# Altium footprint library Miscellaneous Connectors.PcbLib: 245 footprints (part 15 of 16)
Each footprint in its own frame and in the unit in brackets; x right, y up, seen from the top. Pads: shape width x height; smd on the part's side, far side on the other; paste and mask are expansions set on the pad; w line width, h text height; cw(c..) or ccw(c..) is an arc to the next point about the centre after c.
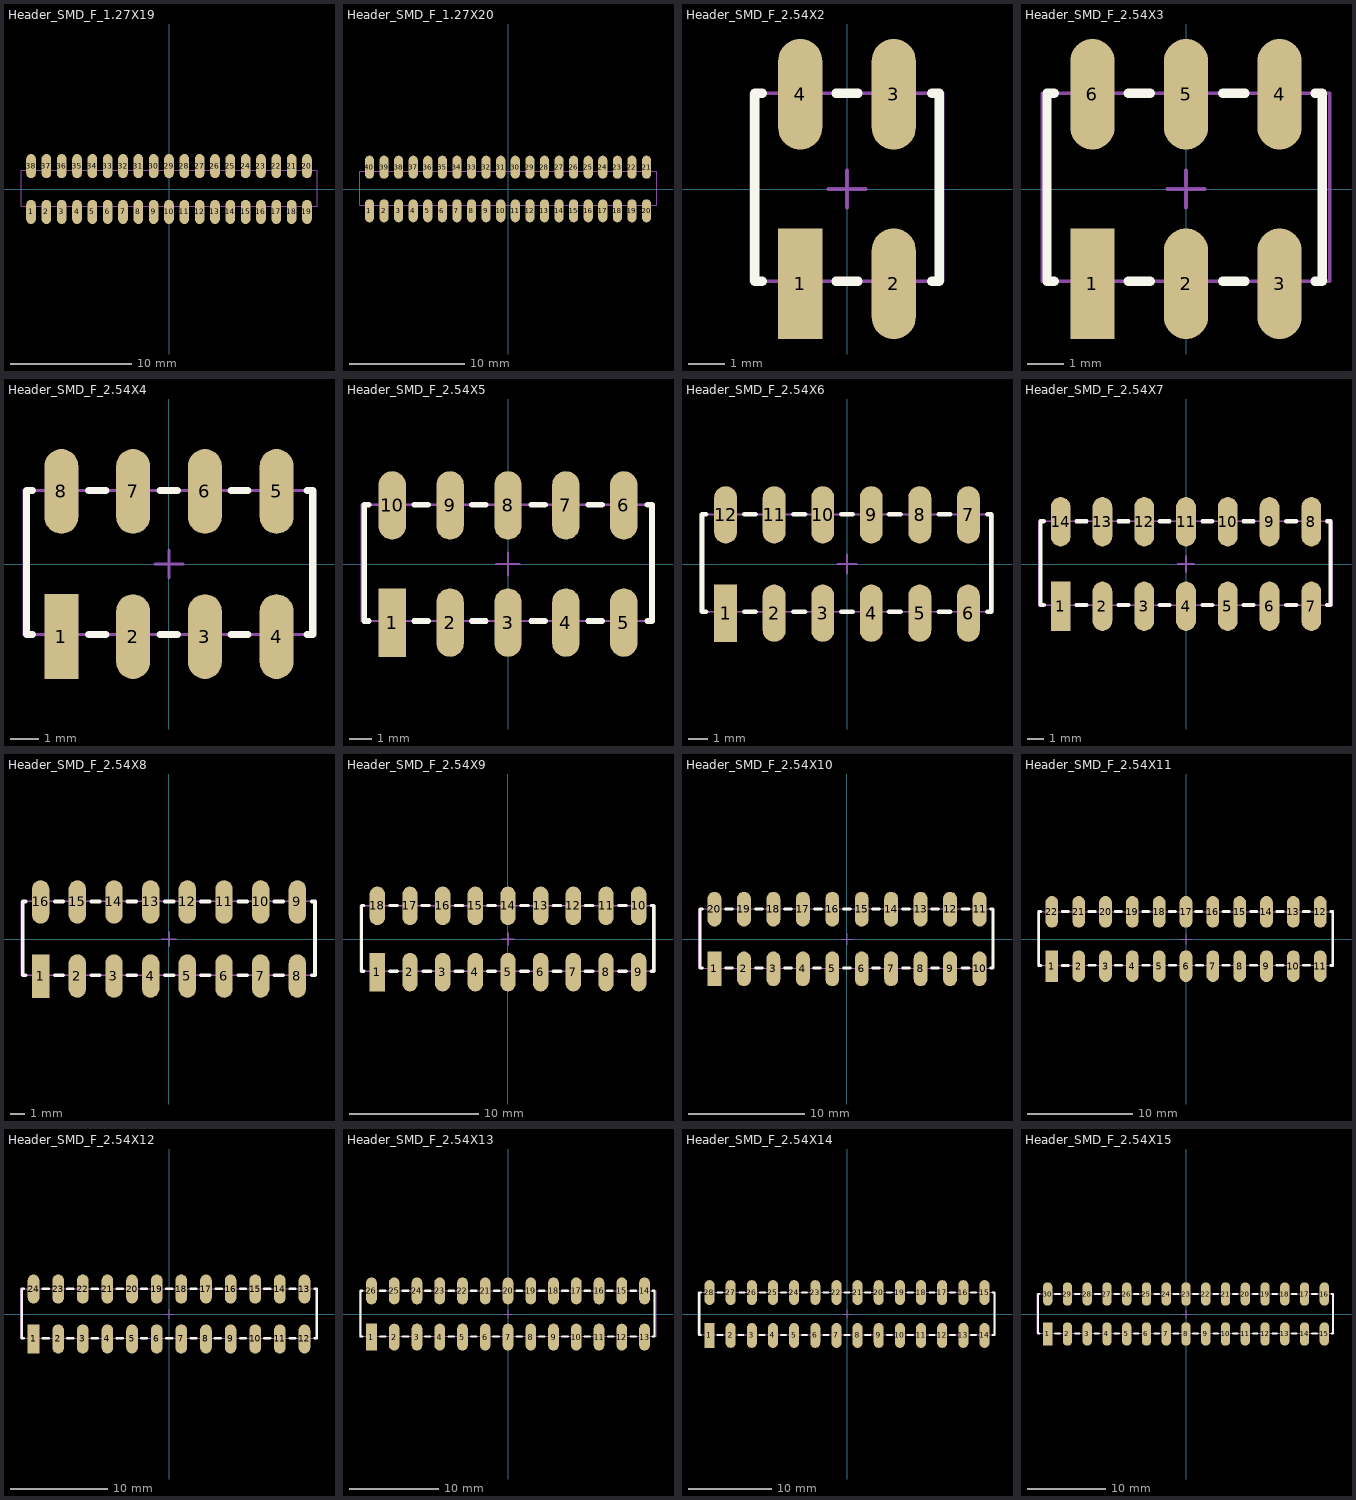
[diagram p14: the footprints below, top view; thin cyan lines are the x and y axes]

## Header_SMD_F_1.27X19 [mm]
pads (38):
  oval 0.8x2 smd: 1(-11.43,-1.9) 2(-10.16,-1.9) 3(-8.89,-1.9) 4(-7.62,-1.9) 5(-6.35,-1.9) 6(-5.08,-1.9) 7(-3.81,-1.9) 8(-2.54,-1.9) 9(-1.27,-1.9) 10(0,-1.9) 11(1.27,-1.9) 12(2.54,-1.9) 13(3.81,-1.9) 14(5.08,-1.9) 15(6.35,-1.9) 16(7.62,-1.9) 17(8.89,-1.9) 18(10.16,-1.9) 19(11.43,-1.9) 20(11.43,1.9) 21(10.16,1.9) 22(8.89,1.9) 23(7.62,1.9) 24(6.35,1.9) 25(5.08,1.9) 26(3.81,1.9) 27(2.54,1.9) 28(1.27,1.9) 29(0,1.9) 30(-1.27,1.9) 31(-2.54,1.9) 32(-3.81,1.9) 33(-5.08,1.9) 34(-6.35,1.9) 35(-7.62,1.9) 36(-8.89,1.9) 37(-10.16,1.9) 38(-11.43,1.9)
Mechanical 15:
  lines w0.1: -12.26,-1.435 12.27,-1.435 12.27,1.565 -12.26,1.565 -12.26,-1.435
3D body: height 4.5, standoff 0, extent -12.26,-2.335 12.27,2.265

## Header_SMD_F_1.27X20 [mm]
pads (40):
  oval 0.8x2 smd: 1(-12.065,-1.9) 2(-10.795,-1.9) 3(-9.525,-1.9) 4(-8.255,-1.9) 5(-6.985,-1.9) 6(-5.715,-1.9) 7(-4.445,-1.9) 8(-3.175,-1.9) 9(-1.905,-1.9) 10(-0.635,-1.9) 11(0.635,-1.9) 12(1.905,-1.9) 13(3.175,-1.9) 14(4.445,-1.9) 15(5.715,-1.9) 16(6.985,-1.9) 17(8.255,-1.9) 18(9.525,-1.9) 19(10.795,-1.9) 20(12.065,-1.9) 21(12.065,1.9) 22(10.795,1.9) 23(9.525,1.9) 24(8.255,1.9) 25(6.985,1.9) 26(5.715,1.9) 27(4.445,1.9) 28(3.175,1.9) 29(1.905,1.9) 30(0.635,1.9) 31(-0.635,1.9) 32(-1.905,1.9) 33(-3.175,1.9) 34(-4.445,1.9) 35(-5.715,1.9) 36(-6.985,1.9) 37(-8.255,1.9) 38(-9.525,1.9) 39(-10.795,1.9) 40(-12.065,1.9)
Mechanical 15:
  lines w0.1: -12.895,-1.435 -12.895,1.565 12.935,1.565 12.935,-1.435 -12.895,-1.435
3D body: height 4.5, standoff 0, extent -12.895,-2.335 12.905,2.265

## Header_SMD_F_2.54X2 [mm]
pads (4):
  rect 1.2x3 smd: 1(-1.27,-2.57)
  oval 1.2x3 smd: 2(1.27,-2.57) 3(1.27,2.57) 4(-1.27,2.57)
Top Overlay:
  lines w0.254: -2.3,-2.5 -2.5,-2.5 -2.5,-2.5 -2.5,2.6 ; -2.3,2.6 -2.5,2.6 ; -0.3,-2.5 0.3,-2.5 ; -0.3,2.6 0.3,2.6 ; 2.3,-2.5 2.5,-2.5 2.5,-2.5 2.5,2.6 ; 2.3,2.6 2.5,2.6 ; -2.5,2.6 -2.5,2.6 ; 2.5,2.6 2.5,2.6
Mechanical 15:
  lines w0.1: -0.5,0 0.5,0 ; 0,-0.5 0,0.5 ; -2.6,-2.5 2.6,-2.5 2.6,2.6 -2.6,2.6 -2.6,-2.5
3D body: height 5.1, standoff 0, extent -2.78,-3.3 2.8,3.3

## Header_SMD_F_2.54X3 [mm]
pads (6):
  rect 1.2x3 smd: 1(-2.54,-2.57)
  oval 1.2x3 smd: 2(0,-2.57) 3(2.54,-2.57) 4(2.54,2.57) 5(0,2.57) 6(-2.54,2.57)
Top Overlay:
  lines w0.254: -3.57,-2.5 -3.77,-2.5 -3.77,-2.5 -3.77,2.6 ; -3.57,2.6 -3.77,2.6 ; -1.57,-2.5 -0.97,-2.5 ; -1.57,2.6 -0.97,2.6 ; 1,-2.5 1.6,-2.5 ; 1,2.6 1.6,2.6 ; 3.5,-2.5 3.7,-2.5 3.7,2.6 3.5,2.6 ; -3.77,2.6 -3.77,2.6
Mechanical 15:
  lines w0.1: -0.5,0 0.5,0 ; 0,-0.5 0,0.5 ; -3.9,-2.5 -3.9,2.6 3.9,2.6 3.9,-2.5 -3.9,-2.5
3D body: height 5.1, standoff 0, extent -4.06,-3.3 4.06,3.3

## Header_SMD_F_2.54X4 [mm]
pads (8):
  rect 1.2x3 smd: 1(-3.81,-2.57)
  oval 1.2x3 smd: 2(-1.27,-2.57) 3(1.27,-2.57) 4(3.81,-2.57) 5(3.81,2.57) 6(1.27,2.57) 7(-1.27,2.57) 8(-3.81,2.57)
Top Overlay:
  lines w0.254: -4.84,-2.5 -5.04,-2.5 -5.04,-2.5 -5.04,2.6 -5.04,2.6 -4.84,2.6 ; -2.84,-2.5 -2.24,-2.5 ; -2.84,2.6 -2.24,2.6 ; -0.31,-2.5 0.29,-2.5 ; -0.31,2.6 0.29,2.6 ; 2.19,-2.5 2.79,-2.5 ; 2.19,2.6 2.79,2.6 ; 4.89,-2.5 5.09,-2.5 5.09,2.6 4.89,2.6
Mechanical 15:
  lines w0.1: -0.5,0 0.5,0 ; 0,-0.5 0,0.5 ; -5.14,-2.5 -5.14,2.6 5.09,2.6 5.09,-2.5 -5.14,-2.5
3D body: height 5.1, standoff 0, extent -5.33,-3.3 5.33,3.3

## Header_SMD_F_2.54X5 [mm]
pads (10):
  rect 1.2x3 smd: 1(-5.08,-2.57)
  oval 1.2x3 smd: 2(-2.54,-2.57) 3(0,-2.57) 4(2.54,-2.57) 5(5.08,-2.57) 6(5.08,2.57) 7(2.54,2.57) 8(0,2.57) 9(-2.54,2.57) 10(-5.08,2.57)
Top Overlay:
  lines w0.254: -6.11,-2.5 -6.31,-2.5 ; -6.11,2.6 -6.31,2.6 ; -4.11,-2.5 -3.51,-2.5 ; -4.11,2.6 -3.51,2.6 ; -1.58,-2.5 -0.98,-2.5 ; -1.58,2.6 -0.98,2.6 ; 1.02,-2.5 1.62,-2.5 ; 1.02,2.6 1.62,2.6 ; 3.52,-2.5 4.12,-2.5 ; 3.52,2.6 4.12,2.6 ; 6.12,-2.5 6.32,-2.5 6.32,2.6 6.12,2.6 ; -6.31,-2.5 -6.31,-2.5 ; -6.31,-2.5 -6.31,2.6 ; -6.31,2.6 -6.31,2.6
Mechanical 15:
  lines w0.1: -0.51,0 0.5,0 ; 0,-0.5 0,0.5 ; -6.41,-2.5 -6.41,2.6 6.32,2.6 6.32,-2.5 -6.41,-2.5
3D body: height 5.1, standoff 0, extent -6.6,-3.3 6.6,3.3

## Header_SMD_F_2.54X6 [mm]
pads (12):
  rect 1.2x3 smd: 1(-6.35,-2.57)
  oval 1.2x3 smd: 2(-3.81,-2.57) 3(-1.27,-2.57) 4(1.27,-2.57) 5(3.81,-2.57) 6(6.35,-2.57) 7(6.35,2.57) 8(3.81,2.57) 9(1.27,2.57) 10(-1.27,2.57) 11(-3.81,2.57) 12(-6.35,2.57)
Top Overlay:
  lines w0.254: -7.38,-2.5 -7.58,-2.5 -7.58,-2.5 -7.58,2.6 ; -7.38,2.6 -7.58,2.6 ; -5.38,-2.5 -4.78,-2.5 ; -5.38,2.6 -4.78,2.6 ; -2.8,-2.5 -2.2,-2.5 ; -2.8,2.6 -2.2,2.6 ; -0.3,-2.5 0.3,-2.5 ; -0.3,2.6 0.3,2.6 ; 2.2,-2.5 2.8,-2.5 ; 2.2,2.6 2.8,2.6 ; 4.8,-2.5 5.4,-2.5 ; 4.8,2.6 5.4,2.6 ; 7.35,-2.5 7.55,-2.5 7.55,2.6 7.35,2.6 ; -7.58,2.6 -7.58,2.6
Mechanical 15:
  lines w0.1: -0.5,0 0.5,0 ; 0,-0.5 0,0.5 ; -7.68,-2.5 7.65,-2.5 7.65,2.6 -7.68,2.6 -7.68,-2.5
3D body: height 5.1, standoff 0, extent -7.87,-3.3 7.87,3.3

## Header_SMD_F_2.54X7 [mm]
pads (14):
  rect 1.2x3 smd: 1(-7.62,-2.57)
  oval 1.2x3 smd: 2(-5.08,-2.57) 3(-2.54,-2.57) 4(0,-2.57) 5(2.54,-2.57) 6(5.08,-2.57) 7(7.62,-2.57) 8(7.62,2.57) 9(5.08,2.57) 10(2.54,2.57) 11(0,2.57) 12(-2.54,2.57) 13(-5.08,2.57) 14(-7.62,2.57)
Top Overlay:
  lines w0.254: -8.65,-2.5 -8.85,-2.5 ; -8.65,2.6 -8.85,2.6 ; -6.65,-2.5 -6.05,-2.5 ; -6.65,2.6 -6.05,2.6 ; -4.1,-2.5 -3.5,-2.5 ; -4.1,2.6 -3.5,2.6 ; -1.6,-2.5 -1,-2.5 ; -1.6,2.6 -1,2.6 ; 1,-2.5 1.6,-2.5 ; 1,2.6 1.6,2.6 ; 3.5,-2.5 4.1,-2.5 ; 3.5,2.6 4.1,2.6 ; 6.1,-2.5 6.7,-2.5 ; 6.1,2.6 6.7,2.6 ; 8.58,-2.5 8.78,-2.5 8.78,2.6 8.58,2.6 ; -8.85,-2.5 -8.85,-2.5 ; -8.85,-2.5 -8.85,2.6 ; -8.85,2.6 -8.85,2.6
Mechanical 15:
  lines w0.1: -0.5,0 0.5,0 ; 0,-0.5 0,0.5 ; -8.95,-2.5 -8.95,2.6 8.88,2.6 8.88,-2.5 -8.95,-2.5
3D body: height 5.1, standoff 0, extent -9.14,-3.3 9.14,3.3

## Header_SMD_F_2.54X8 [mm]
pads (16):
  rect 1.2x3 smd: 1(-8.89,-2.57)
  oval 1.2x3 smd: 2(-6.35,-2.57) 3(-3.81,-2.57) 4(-1.27,-2.57) 5(1.27,-2.57) 6(3.81,-2.57) 7(6.35,-2.57) 8(8.89,-2.57) 9(8.89,2.57) 10(6.35,2.57) 11(3.81,2.57) 12(1.27,2.57) 13(-1.27,2.57) 14(-3.81,2.57) 15(-6.35,2.57) 16(-8.89,2.57)
Top Overlay:
  lines w0.254: -9.92,-2.5 -10.12,-2.5 -10.12,-2.5 -10.12,2.6 -10.12,2.6 -9.92,2.6 ; -7.92,-2.5 -7.32,-2.5 ; -7.92,2.6 -7.32,2.6 ; -5.39,-2.5 -4.79,-2.5 ; -5.39,2.6 -4.79,2.6 ; -2.89,-2.5 -2.29,-2.5 ; -2.89,2.6 -2.29,2.6 ; -0.29,-2.5 0.31,-2.5 ; -0.29,2.6 0.31,2.6 ; 2.21,-2.5 2.81,-2.5 ; 2.21,2.6 2.81,2.6 ; 4.81,-2.5 5.41,-2.5 ; 4.81,2.6 5.41,2.6 ; 7.31,-2.5 7.91,-2.5 ; 7.31,2.6 7.91,2.6 ; 9.91,-2.5 10.11,-2.5 10.11,2.6 9.91,2.6
Mechanical 15:
  lines w0.1: -0.5,0 0.5,0 ; 0,-0.5 0,0.5 ; -10.22,-2.5 -10.22,2.6 10.21,2.6 10.21,-2.5 -10.22,-2.5
3D body: height 5.1, standoff 0, extent -10.41,-3.3 10.41,3.3

## Header_SMD_F_2.54X9 [mm]
pads (18):
  rect 1.2x3 smd: 1(-10.16,-2.57)
  oval 1.2x3 smd: 2(-7.62,-2.57) 3(-5.08,-2.57) 4(-2.54,-2.57) 5(0,-2.57) 6(2.54,-2.57) 7(5.08,-2.57) 8(7.62,-2.57) 9(10.16,-2.57) 10(10.16,2.57) 11(7.62,2.57) 12(5.08,2.57) 13(2.54,2.57) 14(0,2.57) 15(-2.54,2.57) 16(-5.08,2.57) 17(-7.62,2.57) 18(-10.16,2.57)
Top Overlay:
  lines w0.254: -11.19,-2.5 -11.39,-2.5 -11.39,-2.5 -11.39,2.6 -11.39,2.6 -11.19,2.6 ; -9.19,-2.5 -8.59,-2.5 ; -9.19,2.6 -8.59,2.6 ; -6.7,2.6 -6.1,2.6 ; -6.6,-2.5 -6,-2.5 ; -4.1,-2.5 -3.5,-2.5 ; -4.1,2.6 -3.5,2.6 ; -1.6,-2.5 -1,-2.5 ; -1.6,2.6 -1,2.6 ; 1,-2.5 1.6,-2.5 ; 1,2.6 1.6,2.6 ; 3.5,-2.5 4.1,-2.5 ; 3.5,2.6 4.1,2.6 ; 6,-2.5 6.6,-2.5 ; 6,2.6 6.6,2.6 ; 8.6,-2.5 9.2,-2.5 ; 8.6,2.6 9.2,2.6 ; 11.14,-2.5 11.34,-2.5 11.34,2.6 11.14,2.6
Mechanical 15:
  lines w0.1: -0.5,0 0.5,0 ; 0,-0.5 0,0.5 ; -11.49,-2.5 11.44,-2.5 11.44,2.6 -11.49,2.6 -11.49,-2.5
3D body: height 5.1, standoff 0, extent -11.68,-3.3 11.68,3.3

## Header_SMD_F_2.54X10 [mm]
pads (20):
  rect 1.2x3 smd: 1(-11.43,-2.57)
  oval 1.2x3 smd: 2(-8.89,-2.57) 3(-6.35,-2.57) 4(-3.81,-2.57) 5(-1.27,-2.57) 6(1.27,-2.57) 7(3.81,-2.57) 8(6.35,-2.57) 9(8.89,-2.57) 10(11.43,-2.57) 11(11.43,2.57) 12(8.89,2.57) 13(6.35,2.57) 14(3.81,2.57) 15(1.27,2.57) 16(-1.27,2.57) 17(-3.81,2.57) 18(-6.35,2.57) 19(-8.89,2.57) 20(-11.43,2.57)
Top Overlay:
  lines w0.254: -12.46,-2.5 -12.66,-2.5 -12.66,-2.5 -12.66,2.6 -12.66,2.6 -12.46,2.6 ; -10.46,-2.5 -9.86,-2.5 ; -10.46,2.6 -9.86,2.6 ; -7.9,-2.5 -7.3,-2.5 ; -7.9,2.6 -7.3,2.6 ; -5.4,-2.5 -4.8,-2.5 ; -5.4,2.6 -4.8,2.6 ; -2.9,-2.5 -2.3,-2.5 ; -2.8,2.6 -2.2,2.6 ; -0.3,-2.5 0.3,-2.5 ; -0.3,2.6 0.3,2.6 ; 2.2,-2.5 2.8,-2.5 ; 2.2,2.6 2.8,2.6 ; 4.8,-2.5 5.4,-2.5 ; 4.8,2.6 5.4,2.6 ; 7.3,-2.5 7.9,-2.5 ; 7.3,2.6 7.9,2.6 ; 9.9,-2.5 10.5,-2.5 ; 9.9,2.6 10.5,2.6 ; 12.37,-2.5 12.57,-2.5 12.57,2.6 12.37,2.6
Mechanical 15:
  lines w0.1: -0.5,0 0.5,0 ; 0,-0.5 0,0.5 ; -12.76,-2.5 -12.76,2.6 12.67,2.6 12.67,-2.5 -12.76,-2.5
3D body: height 5.1, standoff 0, extent -12.95,-3.3 12.95,3.3

## Header_SMD_F_2.54X11 [mm]
pads (22):
  rect 1.2x3 smd: 1(-12.7,-2.57)
  oval 1.2x3 smd: 2(-10.16,-2.57) 3(-7.62,-2.57) 4(-5.08,-2.57) 5(-2.54,-2.57) 6(0,-2.57) 7(2.54,-2.57) 8(5.08,-2.57) 9(7.62,-2.57) 10(10.16,-2.57) 11(12.7,-2.57) 12(12.7,2.57) 13(10.16,2.57) 14(7.62,2.57) 15(5.08,2.57) 16(2.54,2.57) 17(0,2.57) 18(-2.54,2.57) 19(-5.08,2.57) 20(-7.62,2.57) 21(-10.16,2.57) 22(-12.7,2.57)
Top Overlay:
  lines w0.254: -13.73,-2.5 -13.93,-2.5 ; -13.73,2.6 -13.93,2.6 ; -11.73,-2.5 -11.13,-2.5 ; -11.73,2.6 -11.13,2.6 ; -9.2,-2.5 -8.6,-2.5 ; -9.2,2.6 -8.6,2.6 ; -6.7,-2.5 -6.1,-2.5 ; -6.7,2.6 -6.1,2.6 ; -4.1,-2.5 -3.5,-2.5 ; -4.1,2.6 -3.5,2.6 ; -1.6,-2.5 -1,-2.5 ; -1.6,2.6 -1,2.6 ; 0.9,2.6 1.5,2.6 ; 1,-2.5 1.6,-2.5 ; 3.5,-2.5 4.1,-2.5 ; 3.5,2.6 4.1,2.6 ; 6.1,-2.5 6.7,-2.5 ; 6.1,2.6 6.7,2.6 ; 8.6,-2.5 9.2,-2.5 ; 8.6,2.6 9.2,2.6 ; 11.1,-2.5 11.7,-2.5 ; 11.1,2.6 11.7,2.6 ; 13.7,-2.5 13.9,-2.5 13.9,2.6 13.7,2.6 ; -13.93,-2.5 -13.93,-2.5 ; -13.93,-2.5 -13.93,2.6 ; -13.93,2.6 -13.93,2.6
Mechanical 15:
  lines w0.1: -0.5,0 0.5,0 ; 0,-0.5 0,0.5 ; -14.03,-2.5 -14.03,2.6 14,2.6 14,-2.5 -14.03,-2.5
3D body: height 5.1, standoff 0, extent -14.22,-3.3 14.22,3.3

## Header_SMD_F_2.54X12 [mm]
pads (24):
  rect 1.2x3 smd: 1(-13.97,-2.57)
  oval 1.2x3 smd: 2(-11.43,-2.57) 3(-8.89,-2.57) 4(-6.35,-2.57) 5(-3.81,-2.57) 6(-1.27,-2.57) 7(1.27,-2.57) 8(3.81,-2.57) 9(6.35,-2.57) 10(8.89,-2.57) 11(11.43,-2.57) 12(13.97,-2.57) 13(13.97,2.57) 14(11.43,2.57) 15(8.89,2.57) 16(6.35,2.57) 17(3.81,2.57) 18(1.27,2.57) 19(-1.27,2.57) 20(-3.81,2.57) 21(-6.35,2.57) 22(-8.89,2.57) 23(-11.43,2.57) 24(-13.97,2.57)
Top Overlay:
  lines w0.254: -15,-2.5 -15.2,-2.5 -15.2,-2.5 -15.2,2.6 ; -15,2.6 -15.2,2.6 ; -13,-2.5 -12.4,-2.5 ; -13,2.6 -12.4,2.6 ; -10.47,-2.5 -9.87,-2.5 ; -10.47,2.6 -9.87,2.6 ; -7.97,-2.5 -7.37,-2.5 ; -7.97,2.6 -7.37,2.6 ; -5.37,-2.5 -4.77,-2.5 ; -5.37,2.6 -4.77,2.6 ; -2.87,-2.5 -2.27,-2.5 ; -2.87,2.6 -2.27,2.6 ; -0.27,-2.5 0.33,-2.5 ; -0.27,2.6 0.33,2.6 ; 2.23,-2.5 2.83,-2.5 ; 2.23,2.6 2.83,2.6 ; 4.73,-2.5 5.33,-2.5 ; 4.83,2.6 5.43,2.6 ; 7.33,-2.5 7.93,-2.5 ; 7.33,2.6 7.93,2.6 ; 9.83,-2.5 10.43,-2.5 ; 9.83,2.6 10.43,2.6 ; 12.43,-2.5 13.03,-2.5 ; 12.43,2.6 13.03,2.6 ; 15.03,-2.5 15.23,-2.5 15.23,2.6 15.03,2.6 ; -15.2,2.6 -15.2,2.6
Mechanical 15:
  lines w0.1: -0.5,0 0.5,0 ; 0,-0.5 0,0.5 ; -15.3,-2.5 15.23,-2.5 15.23,2.6 -15.3,2.6 -15.3,-2.5
3D body: height 5.1, standoff 0, extent -15.49,-3.3 15.49,3.3

## Header_SMD_F_2.54X13 [mm]
pads (26):
  rect 1.2x3 smd: 1(-15.24,-2.57)
  oval 1.2x3 smd: 2(-12.7,-2.57) 3(-10.16,-2.57) 4(-7.62,-2.57) 5(-5.08,-2.57) 6(-2.54,-2.57) 7(0,-2.57) 8(2.54,-2.57) 9(5.08,-2.57) 10(7.62,-2.57) 11(10.16,-2.57) 12(12.7,-2.57) 13(15.24,-2.57) 14(15.24,2.57) 15(12.7,2.57) 16(10.16,2.57) 17(7.62,2.57) 18(5.08,2.57) 19(2.54,2.57) 20(0,2.57) 21(-2.54,2.57) 22(-5.08,2.57) 23(-7.62,2.57) 24(-10.16,2.57) 25(-12.7,2.57) 26(-15.24,2.57)
Top Overlay:
  lines w0.254: -16.27,-2.5 -16.47,-2.5 ; -16.27,2.6 -16.47,2.6 ; -14.27,-2.5 -13.67,-2.5 ; -14.27,2.6 -13.67,2.6 ; -11.74,-2.5 -11.14,-2.5 ; -11.74,2.6 -11.14,2.6 ; -9.24,-2.5 -8.64,-2.5 ; -9.24,2.6 -8.64,2.6 ; -6.64,-2.5 -6.04,-2.5 ; -6.64,2.6 -6.04,2.6 ; -4.14,-2.5 -3.54,-2.5 ; -4.14,2.6 -3.54,2.6 ; -1.64,-2.5 -1.04,-2.5 ; -1.54,2.6 -0.94,2.6 ; 0.96,-2.5 1.56,-2.5 ; 0.96,2.6 1.56,2.6 ; 3.46,-2.5 4.06,-2.5 ; 3.46,2.6 4.06,2.6 ; 6.06,-2.5 6.66,-2.5 ; 6.06,2.6 6.66,2.6 ; 8.56,-2.5 9.16,-2.5 ; 8.56,2.6 9.16,2.6 ; 11.06,2.6 11.66,2.6 ; 11.16,-2.5 11.76,-2.5 ; 13.66,-2.5 14.26,-2.5 ; 13.66,2.6 14.26,2.6 ; 16.16,-2.5 16.36,-2.5 16.36,2.6 16.16,2.6 ; -16.47,-2.5 -16.47,-2.5 ; -16.47,-2.5 -16.47,2.6 ; -16.47,2.6 -16.47,2.6
Mechanical 15:
  lines w0.1: -0.5,0 0.5,0 ; 0,-0.5 0,0.5 ; -16.57,-2.5 -16.57,2.6 16.56,2.6 16.56,-2.5 -16.57,-2.5
3D body: height 5.1, standoff 0, extent -16.76,-3.3 16.76,3.3

## Header_SMD_F_2.54X14 [mm]
pads (28):
  rect 1.2x3 smd: 1(-16.51,-2.57)
  oval 1.2x3 smd: 2(-13.97,-2.57) 3(-11.43,-2.57) 4(-8.89,-2.57) 5(-6.35,-2.57) 6(-3.81,-2.57) 7(-1.27,-2.57) 8(1.27,-2.57) 9(3.81,-2.57) 10(6.35,-2.57) 11(8.89,-2.57) 12(11.43,-2.57) 13(13.97,-2.57) 14(16.51,-2.57) 15(16.51,2.57) 16(13.97,2.57) 17(11.43,2.57) 18(8.89,2.57) 19(6.35,2.57) 20(3.81,2.57) 21(1.27,2.57) 22(-1.27,2.57) 23(-3.81,2.57) 24(-6.35,2.57) 25(-8.89,2.57) 26(-11.43,2.57) 27(-13.97,2.57) 28(-16.51,2.57)
Top Overlay:
  lines w0.254: -17.54,-2.5 -17.74,-2.5 -17.74,-2.5 -17.74,2.6 ; -17.54,2.6 -17.74,2.6 ; -15.54,-2.5 -14.94,-2.5 ; -15.54,2.6 -14.94,2.6 ; -13.01,-2.5 -12.41,-2.5 ; -12.91,2.6 -12.31,2.6 ; -10.51,-2.5 -9.91,-2.5 ; -10.41,2.6 -9.81,2.6 ; -7.91,-2.5 -7.31,-2.5 ; -7.91,2.6 -7.31,2.6 ; -5.41,-2.5 -4.81,-2.5 ; -5.41,2.6 -4.81,2.6 ; -2.81,-2.5 -2.21,-2.5 ; -2.81,2.6 -2.21,2.6 ; -0.31,-2.5 0.29,-2.5 ; -0.31,2.6 0.29,2.6 ; 2.19,-2.5 2.79,-2.5 ; 2.19,2.6 2.79,2.6 ; 4.79,-2.5 5.39,-2.5 ; 4.79,2.6 5.39,2.6 ; 7.29,-2.5 7.89,-2.5 ; 7.29,2.6 7.89,2.6 ; 9.89,-2.5 10.49,-2.5 ; 9.89,2.6 10.49,2.6 ; 12.39,-2.5 12.99,-2.5 ; 12.39,2.6 12.99,2.6 ; 14.89,-2.5 15.49,-2.5 ; 14.89,2.6 15.49,2.6 ; 17.49,-2.5 17.69,-2.5 17.69,2.6 17.49,2.6 ; -17.74,2.6 -17.74,2.6
Mechanical 15:
  lines w0.1: -0.5,0 0.5,0 ; 0,-0.5 0,0.5 ; -17.84,-2.5 17.79,-2.5 17.79,2.6 -17.84,2.6 -17.84,-2.5
3D body: height 5.1, standoff 0, extent -18.03,-3.3 18.03,3.3

## Header_SMD_F_2.54X15 [mm]
pads (30):
  rect 1.2x3 smd: 1(-17.78,-2.57)
  oval 1.2x3 smd: 2(-15.24,-2.57) 3(-12.7,-2.57) 4(-10.16,-2.57) 5(-7.62,-2.57) 6(-5.08,-2.57) 7(-2.54,-2.57) 8(0,-2.57) 9(2.54,-2.57) 10(5.08,-2.57) 11(7.62,-2.57) 12(10.16,-2.57) 13(12.7,-2.57) 14(15.24,-2.57) 15(17.78,-2.57) 16(17.78,2.57) 17(15.24,2.57) 18(12.7,2.57) 19(10.16,2.57) 20(7.62,2.57) 21(5.08,2.57) 22(2.54,2.57) 23(0,2.57) 24(-2.54,2.57) 25(-5.08,2.57) 26(-7.62,2.57) 27(-10.16,2.57) 28(-12.7,2.57) 29(-15.24,2.57) 30(-17.78,2.57)
Top Overlay:
  lines w0.254: -18.81,-2.5 -19.01,-2.5 ; -18.81,2.6 -19.01,2.6 ; -16.81,-2.5 -16.21,-2.5 ; -16.81,2.6 -16.21,2.6 ; -14.28,-2.5 -13.68,-2.5 ; -14.28,2.6 -13.68,2.6 ; -11.78,-2.5 -11.18,-2.5 ; -11.68,2.6 -11.08,2.6 ; -9.18,-2.5 -8.58,-2.5 ; -9.18,2.6 -8.58,2.6 ; -6.68,-2.5 -6.08,-2.5 ; -6.68,2.6 -6.08,2.6 ; -4.08,-2.5 -3.48,-2.5 ; -4.08,2.6 -3.48,2.6 ; -1.58,-2.5 -0.98,-2.5 ; -1.58,2.6 -0.98,2.6 ; 0.92,-2.5 1.52,-2.5 ; 0.92,2.6 1.52,2.6 ; 3.52,-2.5 4.12,-2.5 ; 3.52,2.6 4.12,2.6 ; 6.02,-2.5 6.62,-2.5 ; 6.02,2.6 6.62,2.6 ; 8.62,-2.5 9.22,-2.5 ; 8.62,2.6 9.22,2.6 ; 11.12,-2.5 11.72,-2.5 ; 11.12,2.6 11.72,2.6 ; 13.62,-2.5 14.22,-2.5 ; 13.62,2.6 14.22,2.6 ; 16.22,-2.5 16.82,-2.5 ; 16.22,2.6 16.82,2.6 ; 18.72,-2.5 18.92,-2.5 18.92,2.6 18.72,2.6 ; -19.01,-2.5 -19.01,2.6 ; -19.01,-2.5 -19.01,-2.5 ; -19.01,2.6 -19.01,2.6
Mechanical 15:
  lines w0.1: -0.5,0 0.5,0 ; 0,-0.5 0,0.5 ; -19.11,-2.5 19.02,-2.5 19.02,2.6 -19.11,2.6 -19.11,-2.5
3D body: height 5.1, standoff 0, extent -19.3,-3.3 19.3,3.3